# Altium footprint library Solar_BMS.PcbLib: 10 footprints
Each footprint in its own frame and in the unit in brackets; x right, y up, seen from the top. Pads: shape width x height; smd on the part's side, far side on the other; paste and mask are expansions set on the pad; w line width, h text height; cw(c..) or ccw(c..) is an arc to the next point about the centre after c.
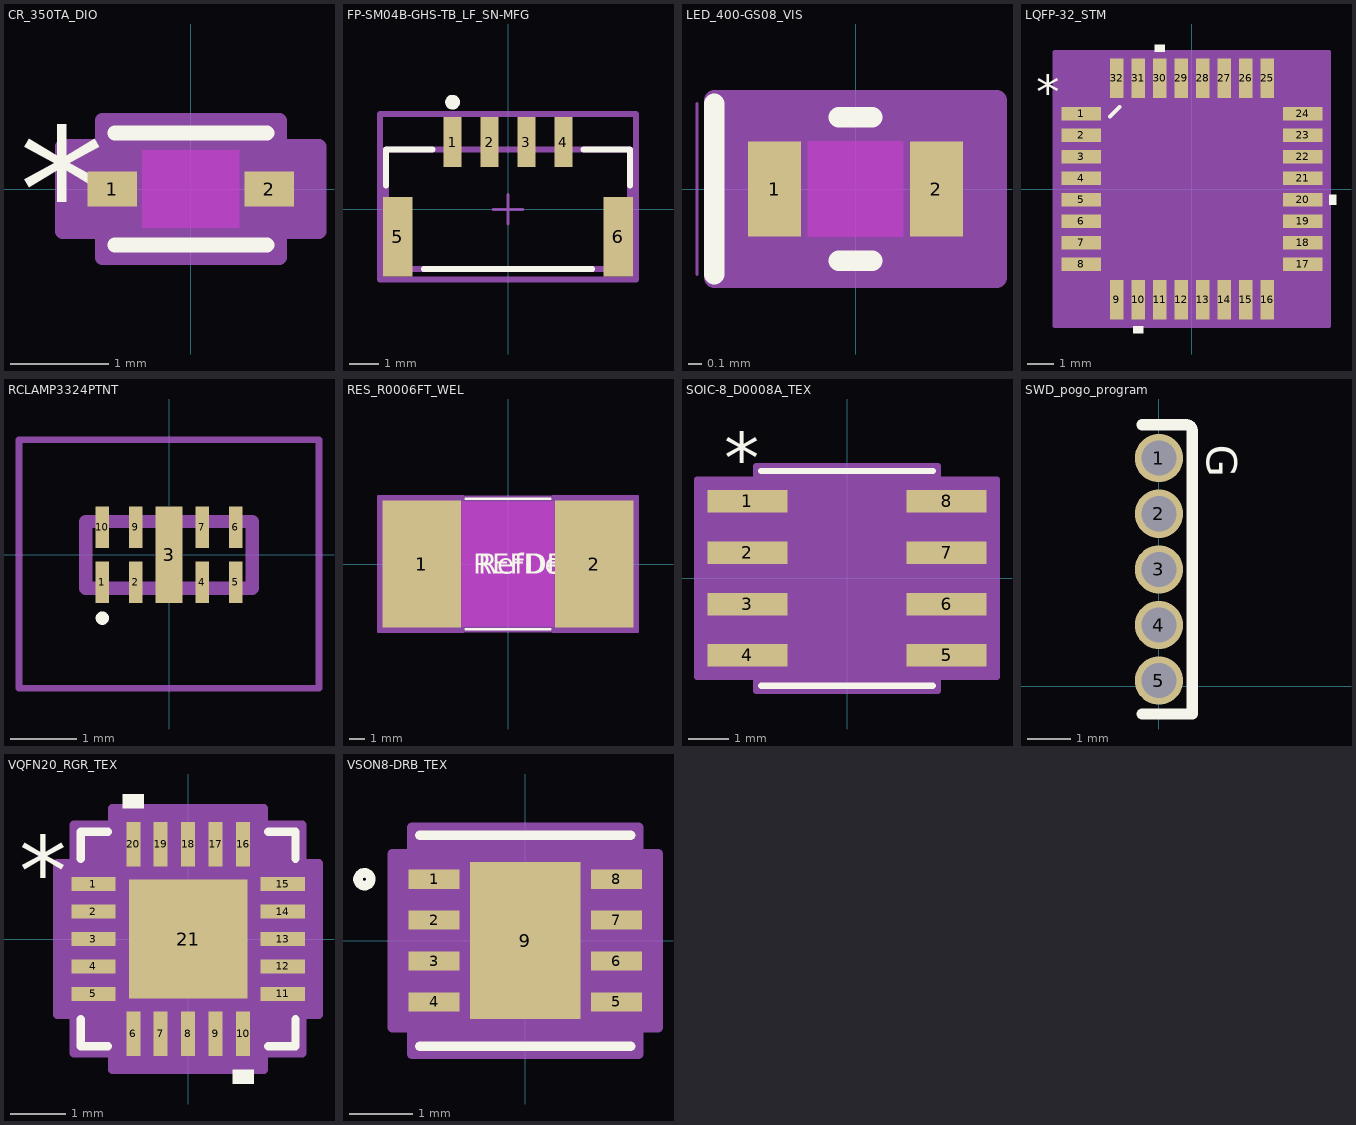
[diagram p0: the footprints below, top view; thin cyan lines are the x and y axes]

## CR_350TA_DIO [mil]
pads (2):
  rect 19.87x14 smd paste+0 mask+0: 1(-31.44,0) 2(31.44,0)
Top Layer keep-out:
  region: -19.5,-15.5 -19.5,15.5 19.5,15.5 19.5,-15.5
Top Overlay:
  lines w6: -30.5,-22.5 30.5,-22.5 ; -30.5,22.5 30.5,22.5
  text ".Designator" at -137.5,-25 h50
  text "*" at -68.87,-25 h50
Keep-Out Layer:
  region: -19.5,-15.5 -19.5,15.5 19.5,15.5 19.5,-15.5
Mechanical 13:
  lines w1: -25.5,-8.75 -16.75,-17.5 ; -25.5,8.75 -16.75,17.5 ; -33.5,-7 -33.5,7 -25.5,7 -25.5,-7 -33.5,-7 ; -25.5,-17.5 25.5,-17.5 25.5,17.5 -25.5,17.5 -25.5,-17.5 ; 25.5,-7 25.5,7 33.5,7 33.5,-7 25.5,-7
  text "*" at -28,-25 h50
  text ".Designator" at -137.5,-25 h50
Mechanical 15:
  region: -35.5,-17 -51.37,-17 -51.37,17 -35.5,17 -35.5,27.5 35.5,27.5 35.5,17 51.37,17 51.37,-17 35.5,-17 35.5,-27.5 -35.5,-27.5
  lines w6: -51.37,-17 -51.37,17 -35.5,17 -35.5,27.5 35.5,27.5 35.5,17 51.37,17 51.37,-17 35.5,-17 35.5,-27.5 -35.5,-27.5 -35.5,-17 -51.37,-17
3D body "CR_350TA_DIO.step": height 26.26, standoff 0, extent -33.5,-17.48 33.5,17.48

## FP-SM04B-GHS-TB_LF_SN-MFG [mm]
height 1.75
pads (6):
  rect 0.6x1.7 smd paste+0 mask+0: 1(-1.875,2.275) 2(-0.625,2.275) 3(0.625,2.275) 4(1.875,2.275)
  rect 1x2.7 smd paste+0 mask+0: 5(-3.725,-0.925) 6(3.725,-0.925)
Top Overlay:
  circle w0.25: c-1.875,3.625 r0.125
  lines w0.2: -4.125,0.8 -4.125,2.025 -2.55,2.025 ; -2.85,-2.025 2.85,-2.025 ; 2.55,2.025 4.125,2.025 4.125,0.8
Top 3D Body:
  lines w0.2: -4.125,-2.025 4.125,-2.025 4.125,2.025 -4.125,2.025 -4.125,-2.025
Top Courtyard:
  lines w0.2: -4.325,-2.375 4.325,-2.375 4.325,3.225 -4.325,3.225 -4.325,-2.375
Top Assembly:
  lines w0.2: -4.325,-2.375 4.325,-2.375 4.325,3.225 -4.325,3.225 -4.325,-2.375
  text ".Designator" at 0.05,1.317 h1
Top Component Center:
  lines w0.1: -0.5,0 0.5,0 ; 0,-0.5 0,0.5
3D body "Conn_JST_SM04B-GHS-TB_LF_SN_eec.STEP": height 0.25, standoff 0, extent -4.325,-2.375 4.325,3.225

## LED_400-GS08_VIS [mil]
pads (2):
  rect 15.5x28 smd paste+0 mask+0: 1(-23.75,0) 2(23.75,0)
Top Layer keep-out:
  region: -14,-14 -14,14 14,14 14,-14
Top Overlay:
  lines w6: -41.5,-25 -41.5,-12.5 -41.5,12.5 -41.5,25 ; -4.93,-21 4.93,-21 ; -4.93,21 4.93,21
Mechanical 13:
  lines w1: -46.5,-25 -46.5,25 ; -31.5,-16 -31.5,16 31.5,16 31.5,-16 -31.5,-16
Mechanical 15:
  region: -41.5,-24 -41.5,24 -41.5,26 41.5,26 41.5,24 41.5,-24 41.5,-26 -41.5,-26
  lines w6: -41.5,-26 41.5,-26 41.5,-24 41.5,24 41.5,26 -41.5,26 -41.5,24 -41.5,-24 -41.5,-26
3D body "LED_400-GS08_VIS.step": height 22.01, standoff 0, extent -31.5,-16.1 31.5,16.1

## LQFP-32_STM [mil]
pads (32):
  rect 58x20 smd paste-29 mask-29: 1(-162,110.24) 2(-162,78.74) 3(-162,47.24) 4(-162,15.75) 5(-162,-15.75) 6(-162,-47.24) 7(-162,-78.74) 8(-162,-110.24) 17(162,-110.24) 18(162,-78.74) 19(162,-47.24) 20(162,-15.75) 21(162,15.75) 22(162,47.24) 23(162,78.74) 24(162,110.24)
  rect 20x58 smd paste-29 mask-29: 9(-110.24,-162) 10(-78.74,-162) 11(-47.24,-162) 12(-15.75,-162) 13(15.75,-162) 14(47.24,-162) 15(78.74,-162) 16(110.24,-162) 25(110.24,162) 26(78.74,162) 27(47.24,162) 28(15.75,162) 29(-15.75,162) 30(-47.24,162) 31(-78.74,162) 32(-110.24,162)
Top Overlay:
  region: -39.74,201 -54.74,201 -54.74,211 -39.74,211
  region: 201,-8.25 211,-8.25 211,-23.25 201,-23.25
  region: -71.24,-201 -86.24,-201 -86.24,-211 -71.24,-211
  lines w6: -119.9,106.1 -106.1,119.9
  text ".Designator" at -137.5,-25 h50
  text "*" at -228.5,115.98 h50
Mechanical 13:
  lines w1: -138,88 -88,138 ; -177,-119.24 -138,-119.24 -138,-101.24 -177,-101.24 -177,-119.24 ; -177,-87.74 -138,-87.74 -138,-69.74 -177,-69.74 -177,-87.74 ; -177,-56.24 -138,-56.24 -138,-38.24 -177,-38.24 -177,-56.24 ; -177,-24.75 -138,-24.75 -138,-6.75 -177,-6.75 -177,-24.75 ; -177,6.75 -138,6.75 -138,24.75 -177,24.75 -177,6.75 ; -177,38.24 -138,38.24 -138,56.24 -177,56.24 -177,38.24 ; -177,69.74 -138,69.74 -138,87.74 -177,87.74 -177,69.74 ; -177,101.24 -138,101.24 -138,119.24 -177,119.24 -177,101.24 ; -138,-138 -138,138 138,138 138,-138 -138,-138 ; -119.24,-177 -101.24,-177 -101.24,-138 -119.24,-138 -119.24,-177 ; -119.24,138 -119.24,177 -101.24,177 -101.24,138 -119.24,138 ; -87.74,-177 -69.74,-177 -69.74,-138 -87.74,-138 -87.74,-177 ; -87.74,138 -87.74,177 -69.74,177 -69.74,138 -87.74,138 ; -56.24,-177 -38.24,-177 -38.24,-138 -56.24,-138 -56.24,-177 ; -56.24,138 -56.24,177 -38.24,177 -38.24,138 -56.24,138 ; -24.75,-177 -6.75,-177 -6.75,-138 -24.75,-138 -24.75,-177 ; -24.75,138 -24.75,177 -6.75,177 -6.75,138 -24.75,138 ; 6.75,-177 24.75,-177 24.75,-138 6.75,-138 6.75,-177 ; 6.75,138 6.75,177 24.75,177 24.75,138 6.75,138 ; 38.24,-177 56.24,-177 56.24,-138 38.24,-138 38.24,-177 ; 38.24,138 38.24,177 56.24,177 56.24,138 38.24,138 ; 69.74,-177 87.74,-177 87.74,-138 69.74,-138 69.74,-177 ; 69.74,138 69.74,177 87.74,177 87.74,138 69.74,138 ; 101.24,-177 119.24,-177 119.24,-138 101.24,-138 101.24,-177 ; 101.24,138 101.24,177 119.24,177 119.24,138 101.24,138 ; 138,-119.24 177,-119.24 177,-101.24 138,-101.24 138,-119.24 ; 138,-87.74 177,-87.74 177,-69.74 138,-69.74 138,-87.74 ; 138,-56.24 177,-56.24 177,-38.24 138,-38.24 138,-56.24 ; 138,-24.75 177,-24.75 177,-6.75 138,-6.75 138,-24.75 ; 138,6.75 177,6.75 177,24.75 138,24.75 138,6.75 ; 138,38.24 177,38.24 177,56.24 138,56.24 138,38.24 ; 138,69.74 177,69.74 177,87.74 138,87.74 138,69.74 ; 138,101.24 177,101.24 177,119.24 138,119.24 138,101.24
  text "*" at -228.5,115.98 h50
  text ".Designator" at -137.5,-25 h50
Mechanical 15:
  region: 201,-201 -201,-201 -201,201 201,201
  lines w6: -201,-201 201,-201 201,201 -201,201 -201,-201
3D body "LQFP-32_STM.step": height 63.11, standoff 0, extent -177.01,-177.01 177.01,177.01

## RCLAMP3324PTNT [mm]
pads (9):
  rect 0.2x0.625 smd: 1(-1,-0.412) 2(-0.5,-0.412) 4(0.5,-0.412) 5(1,-0.412) 6(1,0.413) 7(0.5,0.413) 9(-0.5,0.413) 10(-1,0.413)
  rect 0.4x1.45 smd: 3(0,0)
Top Overlay:
  lines w0.1: -1,-1 cw(c-1,-0.95) -1,-0.9 cw(c-1,-0.95) -1,-1
Mechanical 13:
  lines w0.2: -1.25,-0.5 1.25,-0.5 1.25,0.5 -1.25,0.5 -1.25,-0.5
Mechanical 15:
  lines w0.1: -2.25,-2 2.25,-2 2.25,1.725 -2.25,1.725 -2.25,-2
3D body "RCLAMP3324P.TNT.stp": height 0.6, standoff 0, extent -1.25,-0.46 1.25,0.54

## RES_R0006FT_WEL [mil]
pads (2):
  rect 197x319 smd paste+0 mask+0: 1(-216.5,0) 2(216.5,0)
Top Overlay:
  lines w6: -105.53,-163.5 105.53,-163.5 ; -105.53,163.5 105.53,163.5
  text "RefDes" at -75,-25 h50
  text "REFDES" at -87.5,-25 h50
Keep-Out Layer:
  region: -116,-156.5 -116,156.5 116,156.5 116,-156.5
Mechanical 13:
  lines w1: -102.5,-79.25 -23.25,-158.5 ; -102.5,79.25 -23.25,158.5 ; -102.5,-158.5 -102.5,158.5 ; -102.5,-158.5 102.5,-158.5 ; -102.5,-158.5 -301,-158.5 -301,158.5 -102.5,158.5 ; -102.5,-158.5 -102.5,158.5 ; -102.5,158.5 102.5,158.5 ; 102.5,-158.5 102.5,158.5 ; 102.5,-158.5 301,-158.5 301,158.5 102.5,158.5 ; 102.5,-158.5 102.5,158.5
  text "RefDes2" at -87.5,-25 h50
Mechanical 15:
  region: -112.5,-169.5 -325,-169.5 -325,169.5 -112.5,169.5 -112.5,168.5 112.5,168.5 112.5,169.5 325,169.5 325,-169.5 112.5,-169.5 112.5,-168.5 -112.5,-168.5
  lines w6: -325,-169.5 -112.5,-169.5 -112.5,-168.5 112.5,-168.5 112.5,-169.5 325,-169.5 325,169.5 112.5,169.5 112.5,168.5 -112.5,168.5 -112.5,169.5 -325,169.5 -325,-169.5
3D body "RES_R0006FT_WEL.step": height 18.11, standoff 0, extent -300.98,-158.5 300.98,158.5

## SOIC-8_D0008A_TEX [mil]
pads (8):
  rect 78x22 smd paste+0 mask+0: 1(-97,75) 2(-97,25) 3(-97,-25) 4(-97,-75) 5(97,-75) 6(97,-25) 7(97,25) 8(97,75)
Top Overlay:
  lines w6: -83.5,-104.5 83.5,-104.5 ; -83.5,104.5 83.5,104.5
  text "*" at -119.5,92 h50
  text ".Designator" at -137.5,-25 h50
Mechanical 13:
  lines w1: -12,99.5 ccw(c0,99.5) 12,99.5 ; -122,-85 -78.5,-85 -78.5,-65 -122,-65 -122,-85 ; -122,-35 -78.5,-35 -78.5,-15 -122,-15 -122,-35 ; -122,15 -78.5,15 -78.5,35 -122,35 -122,15 ; -122,65 -78.5,65 -78.5,85 -122,85 -122,65 ; -78.5,-99.5 -78.5,99.5 78.5,99.5 78.5,-99.5 -78.5,-99.5 ; 78.5,-85 122,-85 122,-65 78.5,-65 78.5,-85 ; 78.5,-35 122,-35 122,-15 78.5,-15 78.5,-35 ; 78.5,15 122,15 122,35 78.5,35 78.5,15 ; 78.5,65 122,65 122,85 78.5,85 78.5,65
  text ".Designator" at -137.5,-25 h50
  text "*" at -76,46.5 h50
Mechanical 15:
  region: -88.5,-96 -146,-96 -146,96 -88.5,96 -88.5,109.5 88.5,109.5 88.5,96 146,96 146,-96 88.5,-96 88.5,-109.5 -88.5,-109.5
  lines w6: -146,-96 -88.5,-96 -88.5,-109.5 88.5,-109.5 88.5,-96 146,-96 146,96 88.5,96 88.5,109.5 -88.5,109.5 -88.5,96 -146,96 -146,-96
3D body "SOIC-8_D0008A_TEX.step": height 69.09, standoff 0, extent -122.01,-99.49 122.01,99.49

## SWD_pogo_program [mm]
pads (5):
  round 1.1 smd: 1(0,5.207) 2(0,3.937) 3(0,2.667) 4(0,1.397) 5(0,0.127)
via 0,0.127 diameter 1.1 hole 0.8
via 0,1.397 diameter 1.1 hole 0.8
via 0,3.937 diameter 1.1 hole 0.8
via 0,5.207 diameter 1.1 hole 0.8
via 0,2.667 diameter 1.1 hole 0.8
Top Overlay:
  lines w0.254: -0.381,-0.635 0.762,-0.635 0.762,5.842 ccw(c0.635,5.842) 0.635,5.969 -0.381,5.969
  text "G" at 1.089,5.515 h0.7

## VQFN20_RGR_TEX [mil]
pads (21):
  rect 31.81x10.03 smd paste+0 mask+0: 1(-67.91,39.38) 2(-67.91,19.69) 3(-67.91,0) 4(-67.91,-19.69) 5(-67.91,-39.38) 11(67.91,-39.38) 12(67.91,-19.69) 13(67.91,0) 14(67.91,19.69) 15(67.91,39.38)
  rect 10.03x31.81 smd paste+0 mask+0: 6(-39.38,-67.91) 7(-19.69,-67.91) 8(0,-67.91) 9(19.69,-67.91) 10(39.38,-67.91) 16(39.38,67.91) 17(19.69,67.91) 18(0,67.91) 19(-19.69,67.91) 20(-39.38,67.91)
  rect 85x85 smd paste+0 mask+0: 21(0,0)
Top Overlay:
  region: 46.88,-93.81 31.88,-93.81 31.88,-103.81 46.88,-103.81
  region: -31.88,93.81 -46.88,93.81 -46.88,103.81 -31.88,103.81
  lines w6: -77,-57.5 -77,-77 -57.5,-77 ; -77,57.5 -77,77 -57.5,77 ; 57.5,-77 77,-77 77,-57.5 ; 57.5,77 77,77 77,57.5
  text "*" at -121.31,24.23 h50
  text ".Designator" at -137.5,-25 h50
Mechanical 13:
  lines w1: -72,22 -22,72 ; -72,-72 72,-72 72,72 -72,72 -72,-72 ; -72,-45.38 -72,-33.38 -72,-45.38 ; -72,-25.69 -72,-13.69 -72,-25.69 ; -72,-6 -72,6 -72,-6 ; -72,13.69 -72,25.69 -72,13.69 ; -72,33.38 -72,45.38 -72,33.38 ; -45.38,-72 -33.38,-72 -45.38,-72 ; -45.38,72 -33.38,72 -45.38,72 ; -25.69,-72 -13.69,-72 -25.69,-72 ; -25.69,72 -13.69,72 -25.69,72 ; -6,-72 6,-72 -6,-72 ; -6,72 6,72 -6,72 ; 13.69,-72 25.69,-72 13.69,-72 ; 13.69,72 25.69,72 13.69,72 ; 33.38,-72 45.38,-72 33.38,-72 ; 33.38,72 45.38,72 33.38,72 ; 72,-45.38 72,-33.38 72,-45.38 ; 72,-25.69 72,-13.69 72,-25.69 ; 72,-6 72,6 72,-6 ; 72,13.69 72,25.69 72,13.69 ; 72,33.38 72,45.38 72,33.38
  text ".Designator" at -137.5,-25 h50
  text "*" at -64.5,24.23 h50
Mechanical 15:
  region: -54.4,-82 -82,-82 -82,-54.4 -93.81,-54.4 -93.81,54.4 -82,54.4 -82,82 -54.4,82 -54.4,93.81 54.4,93.81 54.4,82 82,82 82,54.4 93.81,54.4 93.81,-54.4 82,-54.4 82,-82 54.4,-82 54.4,-93.81 -54.4,-93.81
  lines w6: -93.81,-54.4 -82,-54.4 -82,-82 -54.4,-82 -54.4,-93.81 54.4,-93.81 54.4,-82 82,-82 82,-54.4 93.81,-54.4 93.81,54.4 82,54.4 82,82 54.4,82 54.4,93.81 -54.4,93.81 -54.4,82 -82,82 -82,54.4 -93.81,54.4 -93.81,-54.4
3D body "VQFN20_RGR_TEX.step": height 39.09, standoff 0, extent -72.01,-72.01 72.01,72.01

## VSON8-DRB_TEX [mil]
pads (9):
  rect 32x12 smd paste+0 mask+0: 1(-57,38.39) 2(-57,12.8) 3(-57,-12.8) 4(-57,-38.39) 5(57,-38.39) 6(57,-12.8) 7(57,12.8) 8(57,38.39)
  rect 69x98 smd paste+0 mask+0: 9(0,0)
Top Overlay:
  circle w6: c-100.59,38.39 r4
  lines w6: -66,-66 66,-66 ; -66,66 66,66
  text ".Designator" at -137.5,-25 h50
Mechanical 13:
  circle w1: c-41,38.39 r3
  lines w1: -12,61 ccw(c0,61) 12,61 ; -61,-61 61,-61 61,61 -61,61 -61,-61
  text ".Designator" at -137.5,-25 h50
Mechanical 15:
  region: -71,-54.39 -83,-54.39 -83,54.39 -71,54.39 -71,71 71,71 71,54.39 83,54.39 83,-54.39 71,-54.39 71,-71 -71,-71
  lines w6: -83,-54.39 -83,54.39 -71,54.39 -71,71 71,71 71,54.39 83,54.39 83,-54.39 71,-54.39 71,-71 -71,-71 -71,-54.39 -83,-54.39
3D body "VSON8-DRB_TEX.step": height 39.09, standoff 0, extent -60.98,-60.98 60.98,60.98